# Altium footprint library ACB_PcbLib.PcbLib: 152 footprints (part 4 of 10)
Each footprint in its own frame and in the unit in brackets; x right, y up, seen from the top. Pads: shape width x height; smd on the part's side, far side on the other; paste and mask are expansions set on the pad; w line width, h text height; cw(c..) or ccw(c..) is an arc to the next point about the centre after c.
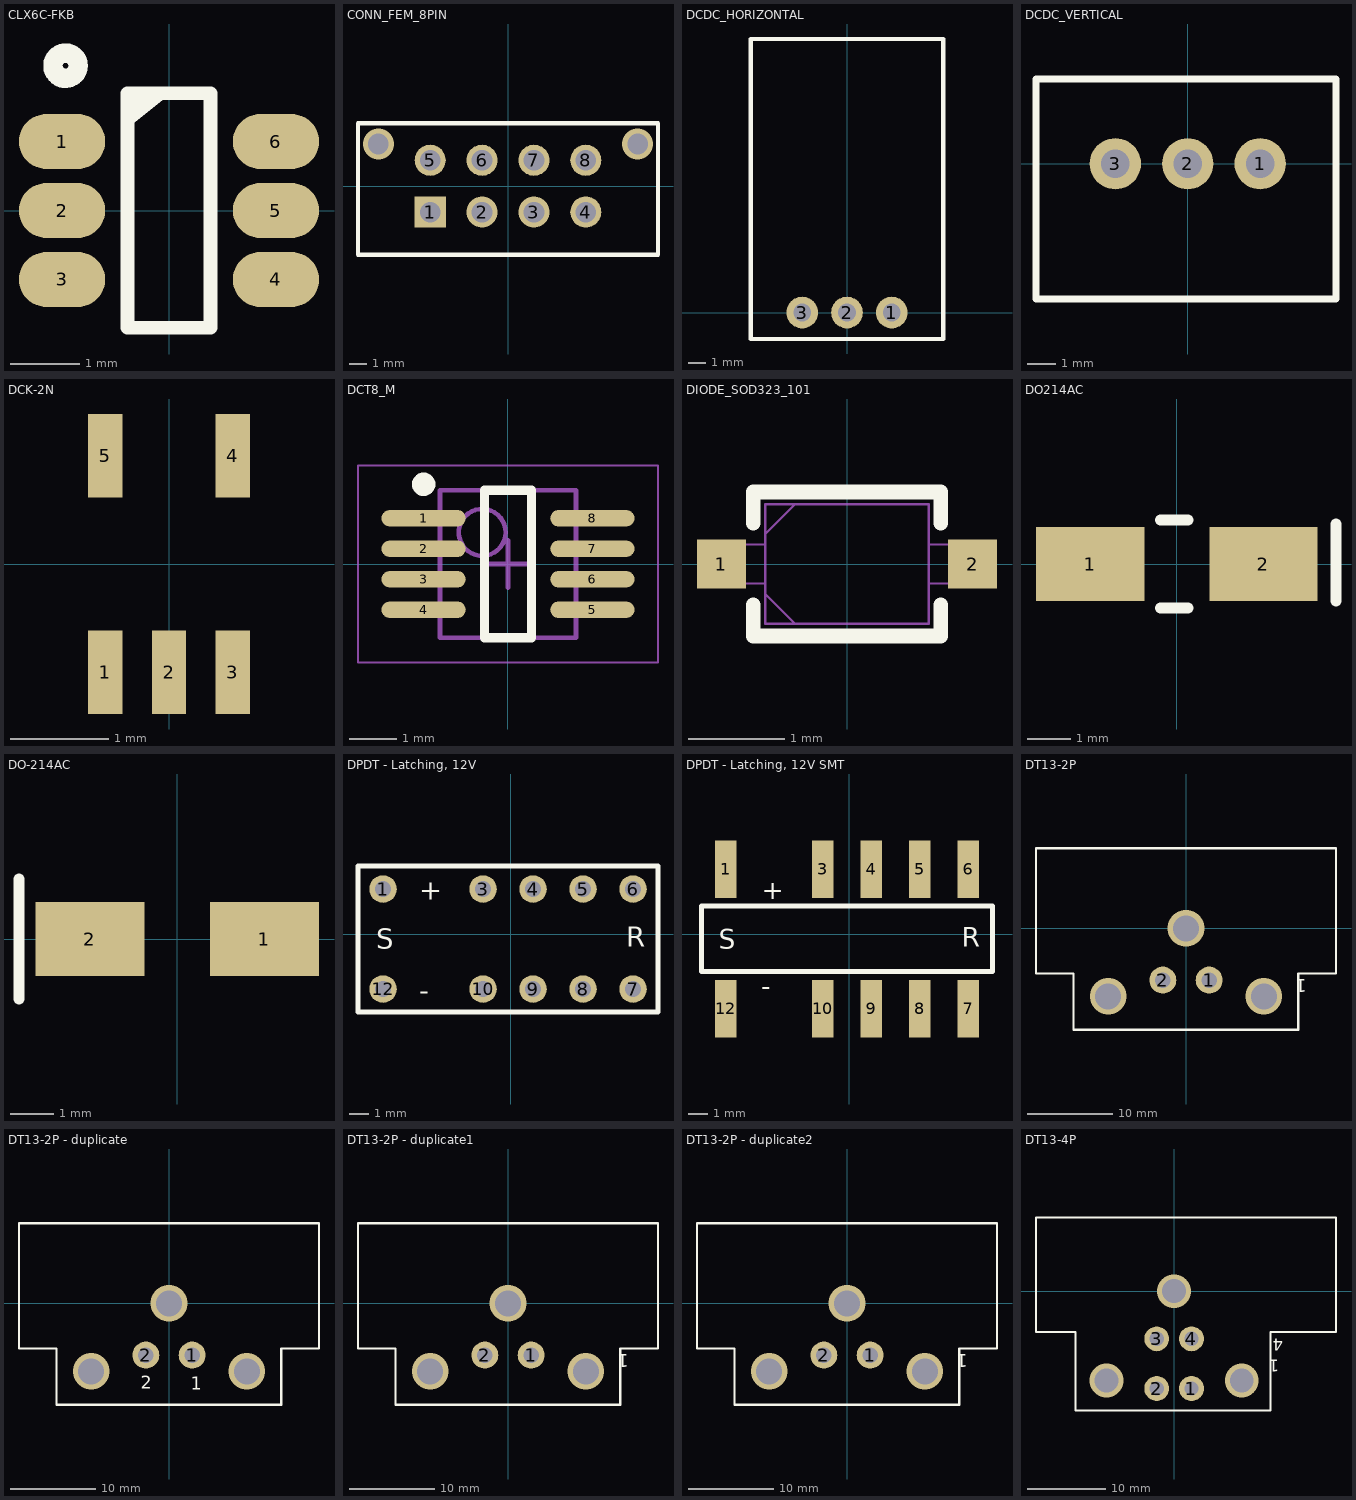
[diagram p3: the footprints below, top view; thin cyan lines are the x and y axes]

## CLX6C-FKB [mm]
pads (6):
  oval 1.25x0.8 smd: 1(-1.55,1) 2(-1.55,0) 3(-1.55,-1) 4(1.55,-1) 5(1.55,0) 6(1.55,1)
Top Overlay:
  circle w0.2: c-1.5,2.1 r0.224
  circle w0.2: c-1.5,2.1 r0.141
  region: -0.6,1.7 -0.1,1.6 -0.6,1.2
  lines w0.2: -0.6,-1.7 0.6,-1.7 0.6,1.7 -0.6,1.7 -0.6,-1.7
3D body: height 2.8, standoff 0, extent -1.7,-1.7 1.7,1.7

## CONN_FEM_8PIN [mm]
pads (8):
  rect 1.8x1.8 hole 1.2: 1(-4.5,-1.5)
  round 1.8 hole 1.2: 2(-1.5,-1.5) 3(1.5,-1.5) 4(4.5,-1.5) 5(-4.5,1.5) 6(-1.5,1.5) 7(1.5,1.5) 8(4.5,1.5)
via -7.5,2.44 diameter 1.8 hole 1.2
via 7.5,2.44 diameter 1.8 hole 1.2
Top Overlay:
  lines w0.254: -8.675,-3.975 8.675,-3.975 8.675,3.65 -8.675,3.65 -8.675,-3.975
  text "." at -4.625,-4.775 h1.52
3D body: height 0.25, standoff 0, extent -0.15,6.175 -0.15,6.175
3D body: height 0.25, standoff 0, extent -0.15,6.175 -0.15,6.175
3D body: height 0.25, standoff 0, extent -0.15,6.175 -0.15,6.175
3D body "430450812.stp": height 9.95, standoff -3.14, extent -8.1,-3.945 8.05,4.825

## DCDC_HORIZONTAL [mm]
pads (3):
  round 1.8 hole 1: 1(2.54,0) 2(0,0) 3(-2.54,0)
Top Overlay:
  lines w0.254: -5.45,-1.5 5.45,-1.5 5.45,15.5 -5.45,15.5 -5.45,-1.5
3D body "mps_dcdc_oki_78sr_horiz_a.step": height 7.75, standoff -5.18, extent -5.232,-1.285 5.182,15.225

## DCDC_VERTICAL [mm]
pads (3):
  round 1.8 hole 1: 1(2.54,0) 2(0,0) 3(-2.54,0)
Top Overlay:
  lines w0.254: -5.325,-4.75 5.2,-4.75 5.2,2.975 -5.325,2.975 -5.325,-4.75
3D body "mps_dcdc_oki_78sr_a.step": height 17.18, standoff -2.63, extent -5.275,-4.867 5.139,2.867

## DCK-2N [mm] "2 input nand"
pads (5):
  rect 0.35x0.85 smd: 1(-0.65,-1.1) 2(0,-1.1) 3(0.65,-1.1) 4(0.65,1.1) 5(-0.65,1.1)
3D body: height 0.25, standoff 0, extent -3.125,0.675 -2.85,0.95
3D body: height 1.1, standoff 0, extent -1.075,-0.7 1.075,0.7
3D body: height 0.25, standoff 0, extent -3.25,1.1 -3.25,1.1

## DCT8_M [mm] "TSOP, 8-Leads, Body 3x2.8mm, Pitch 0.65mm, IPC Low Density"
height 1.3
pads (8):
  oval 1.8x0.35 smd: 1(-1.8,0.975) 2(-1.8,0.325) 3(-1.8,-0.325) 4(-1.8,-0.975) 5(1.8,-0.975) 6(1.8,-0.325) 7(1.8,0.325) 8(1.8,0.975)
Top Overlay:
  circle w0.25: c-1.8,1.7 r0.125
  lines w0.2: -0.5,-1.575 -0.5,1.575 0.5,1.575 0.5,-1.575 -0.5,-1.575
Mechanical 13:
  circle w0.1: c-0.55,0.675 r0.5
  lines w0.1: -1.45,-1.575 -1.45,1.575 1.45,1.575 1.45,-1.575 -1.45,-1.575
Mechanical 15:
  lines w0.05: -3.2,-2.1 -3.2,2.1 3.2,2.1 3.2,-2.1 -3.2,-2.1
  lines w0.1: -0.5,0 0.5,0 ; 0,-0.5 0,0.5
3D body: height 1.3, standoff 0, extent -1.45,-1.575 1.45,1.575

## DIODE_SOD323_101 [mil]
pads (2):
  rect 20x20 smd: 1(-51.5,0) 2(51.5,0)
Top Overlay:
  lines w6: -38.5,-16.74 -38.5,-29.5 38.5,-29.5 38.5,-16.74 ; -38.5,16.74 -38.5,29.5 38.5,29.5 38.5,16.74
Mechanical 1:
  lines w1: -33.5,-12.25 -21.25,-24.5 ; -33.5,12.25 -21.25,24.5 ; -53,-8 -53,8 -33.5,8 -33.5,-8 -53,-8 ; -33.5,-24.5 33.5,-24.5 33.5,24.5 -33.5,24.5 -33.5,-24.5 ; 33.5,-8 33.5,8 53,8 53,-8 33.5,-8
  text "*" at -23.5,0 h31.25
3D body "DIODE_SOD323_1P8X1P35-M.step": height 39.25, standoff 0, extent -53,-24.49 52.98,24.49

## DO214AC [mm]
pads (2):
  rect 2.5x1.7 smd: 1(-2,0) 2(2,0)
Top Overlay:
  lines w0.254: -0.381,-1.016 0.254,-1.016 ; -0.381,1.016 0.254,1.016 ; 3.675,-0.853 3.675,0.925
3D body: height 2.5, standoff 0, extent -2.421,-1.1 2.4,1.1

## DO-214AC [mm]
pads (2):
  rect 2.5x1.7 smd: 1(2,0) 2(-2,0)
Top Overlay:
  lines w0.254: -3.625,-1.375 -3.625,1.375
3D body: height 2.5, standoff 0, extent -2.375,-1.45 2.375,1.45

## DPDT - Latching, 12V [mil] "EC2-12TNU"
pads (10):
  round 55 hole 32: 1(-255,90) 3(-55,90) 4(45,90) 5(145,90) 6(245,90) 7(245,-110) 8(145,-110) 9(45,-110) 10(-55,-110) 12(-255,-110)
Top Overlay:
  lines w9.84: -305,-155.67 -305,135.67 295,135.67 295,-155.67 -305,-155.67
  text "S" at -268.78,-29.68 h40
  text "R" at 231.22,-25.75 h40
  text "+" at -182.17,68.74 h40
  text "-" at -182.17,-132.05 h40
3D body: height 370.08, standoff 0, extent -305,-155 295,135
3D body: height 100, standoff 0, extent -264.84,80.17 -245.15,99.84
3D body: height 100, standoff 0, extent -264.84,-119.82 -245.15,-100.16
3D body: height 100, standoff 0, extent -64.84,80.18 -45.15,99.84
3D body: height 100, standoff 0, extent -64.84,-119.82 -45.15,-100.16
3D body: height 100, standoff 0, extent 35.16,80.17 54.85,99.83
3D body: height 100, standoff 0, extent 35.16,-119.82 54.85,-100.16
3D body: height 100, standoff 0, extent 135.16,-119.82 154.85,-100.16
3D body: height 100, standoff 0, extent 135.16,80.18 154.85,99.84
3D body: height 100, standoff 0, extent 235.16,80.17 254.85,99.84
3D body: height 100, standoff 0, extent 235.16,-119.82 254.85,-100.16

## DPDT - Latching, 12V SMT [mm] "EE2-12TNU"
pads (10):
  rect 1.11x3 smd: 1(-6.477,3.391) 3(-1.397,3.391) 4(1.143,3.391) 5(3.683,3.391) 6(6.223,3.391) 7(6.223,-3.899) 8(3.683,-3.899) 9(1.143,-3.899) 10(-1.397,-3.899) 12(-6.477,-3.899)
Top Overlay:
  lines w0.25: -7.747,-1.956 -7.747,1.473 7.493,1.473 7.493,-1.956 -7.747,-1.956
  text "S" at -6.827,-0.754 h1.02
  text "R" at 5.873,-0.654 h1.02
  text "+" at -4.597,1.829 h1.02
  text "-" at -4.623,-3.2 h1.02
3D body: height 9.4, standoff 0, extent -7.747,-3.937 7.493,3.429

## DT13-2P [mil]
pads (2):
  round 125 hole 72: 1(107.5,-240) 2(-107.5,-240)
via 360.5,-315 diameter 170 hole 120
via -360.5,-315 diameter 170 hole 120
via 0,0 diameter 170 hole 120
Top Overlay:
  lines w10: -521,-470 520,-470 520,-210 695,-210 695,371 ; -521,-465 -521,-210 -695,-210 -695,371 690,371
  text "1" at 560,-235 h60
3D body "DT13-2P.stp": height 1090, standoff -121, extent -695,-475 695,945

## DT13-2P - duplicate [mil]
pads (2):
  round 125 hole 72: 1(107.5,-240) 2(-107.5,-240)
via 0,0 diameter 170 hole 120
via -360.5,-315 diameter 170 hole 120
via 360.5,-315 diameter 170 hole 120
Top Overlay:
  lines w10: -521,-470 520,-470 520,-210 695,-210 695,371 ; -521,-465 -521,-210 -695,-210 -695,371 690,371
  text "2" at -130,-395 h60
  text "1" at 100,-400 h60
  text "." at 550,-455 h60
3D body "DT13-2P.stp": height 1090, standoff -121, extent -695,-475 695,945

## DT13-2P - duplicate1 [mil]
pads (2):
  round 125 hole 72: 1(107.5,-240) 2(-107.5,-240)
via 0,0 diameter 170 hole 120
via -360.5,-315 diameter 170 hole 120
via 360.5,-315 diameter 170 hole 120
Top Overlay:
  lines w10: -521,-470 520,-470 520,-210 695,-210 695,371 ; -521,-465 -521,-210 -695,-210 -695,371 690,371
  text "1" at 560,-235 h60
3D body "DT13-2P.stp": height 1090, standoff -121, extent -695,-475 695,945

## DT13-2P - duplicate2 [mil]
pads (2):
  round 125 hole 72: 1(107.5,-240) 2(-107.5,-240)
via 0,0 diameter 170 hole 120
via -360.5,-315 diameter 170 hole 120
via 360.5,-315 diameter 170 hole 120
Top Overlay:
  lines w10: -521,-470 520,-470 520,-210 695,-210 695,371 ; -521,-465 -521,-210 -695,-210 -695,371 690,371
  text "1" at 560,-235 h60
3D body "DT13-2P.stp": height 1090, standoff -121, extent -695,-475 695,945

## DT13-4P [mil]
pads (4):
  round 125 hole 72: 1(87.5,-490) 2(-87.5,-490) 3(-87.5,-240)
  round 125 hole 72.01: 4(87.5,-240)
via 340.5,-450 diameter 170 hole 120
via -340.5,-450 diameter 170 hole 120
via 0,0 diameter 170 hole 120
Top Overlay:
  lines w10: -500,-205 -695,-205 -695,370 815,370 815,-205 490,-205 ; -495,-205 -495,-600 485,-600 485,-205
  text "1" at 530,-345 h60
  text "4" at 550,-240 h60
3D body "DT13-4P.stp": height 1394, standoff -125, extent -700,-607.5 810,947.5